# Altium footprint library Connectors_HS.PcbLib: 19 footprints (part 2 of 2)
Each footprint in its own frame and in the unit in brackets; x right, y up, seen from the top. Pads: shape width x height; smd on the part's side, far side on the other; paste and mask are expansions set on the pad; w line width, h text height; cw(c..) or ccw(c..) is an arc to the next point about the centre after c.
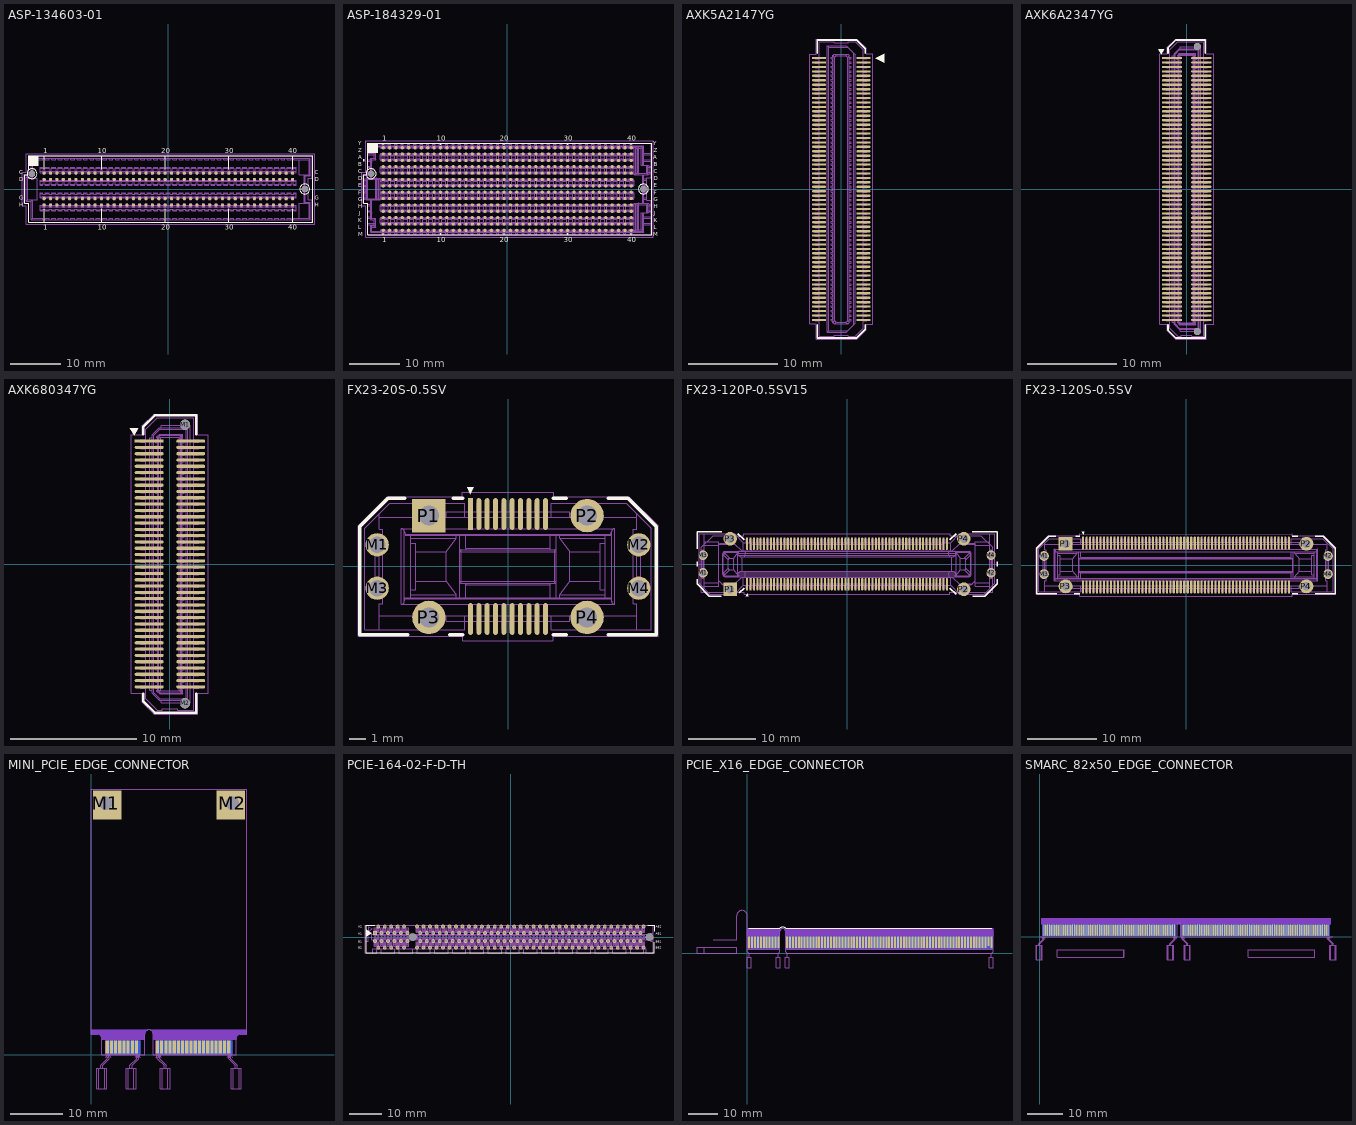
[diagram p1: the footprints below, top view; thin cyan lines are the x and y axes]

## ASP-134603-01 [mm] "VITA57 FMC Connector, LPC"
height 7.57
pads (162):
  round 0.64 smd mask+0.05: C1(-24.765,3.175) C2(-23.495,3.175) C3(-22.225,3.175) C4(-20.955,3.175) C5(-19.685,3.175) C6(-18.415,3.175) C7(-17.145,3.175) C8(-15.875,3.175) C9(-14.605,3.175) C10(-13.335,3.175) C11(-12.065,3.175) C12(-10.795,3.175) C13(-9.525,3.175) C14(-8.255,3.175) C15(-6.985,3.175) C16(-5.715,3.175) C17(-4.445,3.175) C18(-3.175,3.175) C19(-1.905,3.175) C20(-0.635,3.175) C21(0.635,3.175) C22(1.905,3.175) C23(3.175,3.175) C24(4.445,3.175) C25(5.715,3.175) C26(6.985,3.175) C27(8.255,3.175) C28(9.525,3.175) C29(10.795,3.175) C30(12.065,3.175) C31(13.335,3.175) C32(14.605,3.175) C33(15.875,3.175) C34(17.145,3.175) C35(18.415,3.175) C36(19.685,3.175) C37(20.955,3.175) C38(22.225,3.175) C39(23.495,3.175) C40(24.765,3.175) D1(-24.765,1.905) D2(-23.495,1.905) D3(-22.225,1.905) D4(-20.955,1.905) D5(-19.685,1.905) D6(-18.415,1.905) D7(-17.145,1.905) D8(-15.875,1.905) D9(-14.605,1.905) D10(-13.335,1.905) D11(-12.065,1.905) D12(-10.795,1.905) D13(-9.525,1.905) D14(-8.255,1.905) D15(-6.985,1.905) D16(-5.715,1.905) D17(-4.445,1.905) D18(-3.175,1.905) D19(-1.905,1.905) D20(-0.635,1.905) D21(0.635,1.905) D22(1.905,1.905) D23(3.175,1.905) D24(4.445,1.905) D25(5.715,1.905) D26(6.985,1.905) D27(8.255,1.905) D28(9.525,1.905) D29(10.795,1.905) D30(12.065,1.905) D31(13.335,1.905) D32(14.605,1.905) D33(15.875,1.905) D34(17.145,1.905) D35(18.415,1.905) D36(19.685,1.905) D37(20.955,1.905) D38(22.225,1.905) D39(23.495,1.905) D40(24.765,1.905) G1(-24.765,-1.905) G2(-23.495,-1.905) G3(-22.225,-1.905) G4(-20.955,-1.905) G5(-19.685,-1.905) G6(-18.415,-1.905) G7(-17.145,-1.905) G8(-15.875,-1.905) G9(-14.605,-1.905) G10(-13.335,-1.905) G11(-12.065,-1.905) G12(-10.795,-1.905) G13(-9.525,-1.905) G14(-8.255,-1.905) G15(-6.985,-1.905) G16(-5.715,-1.905) G17(-4.445,-1.905) G18(-3.175,-1.905) G19(-1.905,-1.905) G20(-0.635,-1.905) G21(0.635,-1.905) G22(1.905,-1.905) G23(3.175,-1.905) G24(4.445,-1.905) G25(5.715,-1.905) G26(6.985,-1.905) G27(8.255,-1.905) G28(9.525,-1.905) G29(10.795,-1.905) G30(12.065,-1.905) G31(13.335,-1.905) G32(14.605,-1.905) G33(15.875,-1.905) G34(17.145,-1.905) G35(18.415,-1.905) G36(19.685,-1.905) G37(20.955,-1.905) G38(22.225,-1.905) G39(23.495,-1.905) G40(24.765,-1.905) H1(-24.765,-3.175) H2(-23.495,-3.175) H3(-22.225,-3.175) H4(-20.955,-3.175) H5(-19.685,-3.175) H6(-18.415,-3.175) H7(-17.145,-3.175) H8(-15.875,-3.175) H9(-14.605,-3.175) H10(-13.335,-3.175) H11(-12.065,-3.175) H12(-10.795,-3.175) H13(-9.525,-3.175) H14(-8.255,-3.175) H15(-6.985,-3.175) H16(-5.715,-3.175) H17(-4.445,-3.175) H18(-3.175,-3.175) H19(-1.905,-3.175) H20(-0.635,-3.175) H21(0.635,-3.175) H22(1.905,-3.175) H23(3.175,-3.175) H24(4.445,-3.175) H25(5.715,-3.175) H26(6.985,-3.175) H27(8.255,-3.175) H28(9.525,-3.175) H29(10.795,-3.175) H30(12.065,-3.175) H31(13.335,-3.175) H32(14.605,-3.175) H33(15.875,-3.175) H34(17.145,-3.175) H35(18.415,-3.175) H36(19.685,-3.175) H37(20.955,-3.175) H38(22.225,-3.175) H39(23.495,-3.175) H40(24.765,-3.175)
  round 1.27 hole 1.27 unplated: ""(-27.189,3.05) ""(27.191,0)
Top Overlay:
  circle w0.2: c-27.189,3.05 r1
  circle w0.2: c27.191,0 r1
  region: -25.865,6.615 -27.865,6.615 -27.865,4.615 -25.865,4.615
  lines w0.2: -28.2,2.85 -28.665,2.85 -28.665,-2.85 -27.865,-2.85 -27.865,-6.615 28.765,-6.615 28.765,6.615 -27.865,6.615 -27.865,3.8 ; -24.75,-6.6 -24.75,-3.9 ; -24.75,3.9 -24.75,6.6 ; -13.32,-6.6 -13.32,-3.9 ; -13.32,3.9 -13.32,6.6 ; -0.62,-6.6 -0.62,-3.9 ; -0.62,3.9 -0.62,6.6 ; 12.08,-6.6 12.08,-3.9 ; 12.08,3.9 12.08,6.6 ; 24.78,-6.6 24.78,-3.9 ; 24.78,3.9 24.78,6.6
  text "40" at 23.952,-8.1 h1
  text "30" at 11.252,-8.1 h1
  text "20" at -1.448,-8.1 h1
  text "10" at -14.07,-8.1 h1
  text "1" at -24.919,-8.1 h1
  text "40" at 23.952,7.1 h1
  text "30" at 11.252,7.1 h1
  text "20" at -1.448,7.1 h1
  text "10" at -14.07,7.1 h1
  text "1" at -24.919,7.1 h1
  text "H" at 29.233,-3.58 h0.8
  text "G" at 29.214,-2.18 h0.8
  text "D" at 29.233,1.5 h0.8
  text "C" at 29.214,2.9 h0.8
  text "H" at -29.767,-3.58 h0.8
  text "G" at -29.786,-2.18 h0.8
  text "D" at -29.767,1.5 h0.8
  text "C" at -29.786,2.9 h0.8
Top Courtyard:
  lines w0.025: -29.1,-3.3 -28.3,-3.3 -28.3,-7 29.2,-7 29.2,7 -28.3,7 -28.3,3.3 -29.1,3.3 -29.1,-3.3
Top Assembly:
  drawing of 3355 lines, arcs and shapes, not listed
  text ".Designator" at -6.763,7.821 h3
3D body "ASP-134603-01_x_t.x_t": height 6.57, standoff -1.26, extent -28.727,-6.642 28.727,6.642

## ASP-184329-01 [mm] "VITA57.4 FMC Connector, HPC, 560 pin"
height 7.57
pads (562):
  round 0.64 smd mask+0.05: A1(-24.765,5.715) A2(-23.495,5.715) A3(-22.225,5.715) A4(-20.955,5.715) A5(-19.685,5.715) A6(-18.415,5.715) A7(-17.145,5.715) A8(-15.875,5.715) A9(-14.605,5.715) A10(-13.335,5.715) A11(-12.065,5.715) A12(-10.795,5.715) A13(-9.525,5.715) A14(-8.255,5.715) A15(-6.985,5.715) A16(-5.715,5.715) A17(-4.445,5.715) A18(-3.175,5.715) A19(-1.905,5.715) A20(-0.635,5.715) A21(0.635,5.715) A22(1.905,5.715) A23(3.175,5.715) A24(4.445,5.715) A25(5.715,5.715) A26(6.985,5.715) A27(8.255,5.715) A28(9.525,5.715) A29(10.795,5.715) A30(12.065,5.715) A31(13.335,5.715) A32(14.605,5.715) A33(15.875,5.715) A34(17.145,5.715) A35(18.415,5.715) A36(19.685,5.715) A37(20.955,5.715) A38(22.225,5.715) A39(23.495,5.715) A40(24.765,5.715) B1(-24.765,4.445) B2(-23.495,4.445) B3(-22.225,4.445) B4(-20.955,4.445) B5(-19.685,4.445) B6(-18.415,4.445) B7(-17.145,4.445) B8(-15.875,4.445) B9(-14.605,4.445) B10(-13.335,4.445) B11(-12.065,4.445) B12(-10.795,4.445) B13(-9.525,4.445) B14(-8.255,4.445) B15(-6.985,4.445) B16(-5.715,4.445) B17(-4.445,4.445) B18(-3.175,4.445) B19(-1.905,4.445) B20(-0.635,4.445) B21(0.635,4.445) B22(1.905,4.445) B23(3.175,4.445) B24(4.445,4.445) B25(5.715,4.445) B26(6.985,4.445) B27(8.255,4.445) B28(9.525,4.445) B29(10.795,4.445) B30(12.065,4.445) B31(13.335,4.445) B32(14.605,4.445) B33(15.875,4.445) B34(17.145,4.445) B35(18.415,4.445) B36(19.685,4.445) B37(20.955,4.445) B38(22.225,4.445) B39(23.495,4.445) B40(24.765,4.445) C1(-24.765,3.175) C2(-23.495,3.175) C3(-22.225,3.175) C4(-20.955,3.175) C5(-19.685,3.175) C6(-18.415,3.175) C7(-17.145,3.175) C8(-15.875,3.175) C9(-14.605,3.175) C10(-13.335,3.175) C11(-12.065,3.175) C12(-10.795,3.175) C13(-9.525,3.175) C14(-8.255,3.175) C15(-6.985,3.175) C16(-5.715,3.175) C17(-4.445,3.175) C18(-3.175,3.175) C19(-1.905,3.175) C20(-0.635,3.175) C21(0.635,3.175) C22(1.905,3.175) C23(3.175,3.175) C24(4.445,3.175) C25(5.715,3.175) C26(6.985,3.175) C27(8.255,3.175) C28(9.525,3.175) C29(10.795,3.175) C30(12.065,3.175) C31(13.335,3.175) C32(14.605,3.175) C33(15.875,3.175) C34(17.145,3.175) C35(18.415,3.175) C36(19.685,3.175) C37(20.955,3.175) C38(22.225,3.175) C39(23.495,3.175) C40(24.765,3.175) D1(-24.765,1.905) D2(-23.495,1.905) D3(-22.225,1.905) D4(-20.955,1.905) D5(-19.685,1.905) D6(-18.415,1.905) D7(-17.145,1.905) D8(-15.875,1.905) D9(-14.605,1.905) D10(-13.335,1.905) D11(-12.065,1.905) D12(-10.795,1.905) D13(-9.525,1.905) D14(-8.255,1.905) D15(-6.985,1.905) D16(-5.715,1.905) D17(-4.445,1.905) D18(-3.175,1.905) D19(-1.905,1.905) D20(-0.635,1.905) D21(0.635,1.905) D22(1.905,1.905) D23(3.175,1.905) D24(4.445,1.905) D25(5.715,1.905) D26(6.985,1.905) D27(8.255,1.905) D28(9.525,1.905) D29(10.795,1.905) D30(12.065,1.905) D31(13.335,1.905) D32(14.605,1.905) D33(15.875,1.905) D34(17.145,1.905) D35(18.415,1.905) D36(19.685,1.905) D37(20.955,1.905) D38(22.225,1.905) D39(23.495,1.905) D40(24.765,1.905) E1(-24.765,0.635) E2(-23.495,0.635) E3(-22.225,0.635) E4(-20.955,0.635) E5(-19.685,0.635) E6(-18.415,0.635) E7(-17.145,0.635) E8(-15.875,0.635) E9(-14.605,0.635) E10(-13.335,0.635) E11(-12.065,0.635) E12(-10.795,0.635) E13(-9.525,0.635) E14(-8.255,0.635) E15(-6.985,0.635) E16(-5.715,0.635) E17(-4.445,0.635) E18(-3.175,0.635) E19(-1.905,0.635) E20(-0.635,0.635) E21(0.635,0.635) E22(1.905,0.635) E23(3.175,0.635) E24(4.445,0.635) E25(5.715,0.635) E26(6.985,0.635) E27(8.255,0.635) E28(9.525,0.635) E29(10.795,0.635) E30(12.065,0.635) E31(13.335,0.635) E32(14.605,0.635) E33(15.875,0.635) E34(17.145,0.635) E35(18.415,0.635) E36(19.685,0.635) E37(20.955,0.635) E38(22.225,0.635) E39(23.495,0.635) E40(24.765,0.635) F1(-24.765,-0.635) F2(-23.495,-0.635) F3(-22.225,-0.635) F4(-20.955,-0.635) F5(-19.685,-0.635) F6(-18.415,-0.635) F7(-17.145,-0.635) F8(-15.875,-0.635) F9(-14.605,-0.635) F10(-13.335,-0.635) F11(-12.065,-0.635) F12(-10.795,-0.635) F13(-9.525,-0.635) F14(-8.255,-0.635) F15(-6.985,-0.635) F16(-5.715,-0.635) F17(-4.445,-0.635) F18(-3.175,-0.635) F19(-1.905,-0.635) F20(-0.635,-0.635) F21(0.635,-0.635) F22(1.905,-0.635) F23(3.175,-0.635) F24(4.445,-0.635) F25(5.715,-0.635) F26(6.985,-0.635) F27(8.255,-0.635) F28(9.525,-0.635) F29(10.795,-0.635) F30(12.065,-0.635) F31(13.335,-0.635) F32(14.605,-0.635) F33(15.875,-0.635) F34(17.145,-0.635) F35(18.415,-0.635) F36(19.685,-0.635) F37(20.955,-0.635) F38(22.225,-0.635) F39(23.495,-0.635) F40(24.765,-0.635) G1(-24.765,-1.905) G2(-23.495,-1.905) G3(-22.225,-1.905) G4(-20.955,-1.905) G5(-19.685,-1.905) G6(-18.415,-1.905) G7(-17.145,-1.905) G8(-15.875,-1.905) G9(-14.605,-1.905) G10(-13.335,-1.905) G11(-12.065,-1.905) G12(-10.795,-1.905) G13(-9.525,-1.905) G14(-8.255,-1.905) G15(-6.985,-1.905) G16(-5.715,-1.905) G17(-4.445,-1.905) G18(-3.175,-1.905) G19(-1.905,-1.905) G20(-0.635,-1.905) G21(0.635,-1.905) G22(1.905,-1.905) G23(3.175,-1.905) G24(4.445,-1.905) G25(5.715,-1.905) G26(6.985,-1.905) G27(8.255,-1.905) G28(9.525,-1.905) G29(10.795,-1.905) G30(12.065,-1.905) G31(13.335,-1.905) G32(14.605,-1.905) G33(15.875,-1.905) G34(17.145,-1.905) G35(18.415,-1.905) G36(19.685,-1.905) G37(20.955,-1.905) G38(22.225,-1.905) G39(23.495,-1.905) G40(24.765,-1.905) H1(-24.765,-3.175) H2(-23.495,-3.175) H3(-22.225,-3.175) H4(-20.955,-3.175) H5(-19.685,-3.175) H6(-18.415,-3.175) H7(-17.145,-3.175) H8(-15.875,-3.175) H9(-14.605,-3.175) H10(-13.335,-3.175) H11(-12.065,-3.175) H12(-10.795,-3.175) H13(-9.525,-3.175) H14(-8.255,-3.175) H15(-6.985,-3.175) H16(-5.715,-3.175) H17(-4.445,-3.175) H18(-3.175,-3.175) H19(-1.905,-3.175) H20(-0.635,-3.175) H21(0.635,-3.175) H22(1.905,-3.175) H23(3.175,-3.175) H24(4.445,-3.175) H25(5.715,-3.175) H26(6.985,-3.175) H27(8.255,-3.175) H28(9.525,-3.175) H29(10.795,-3.175) H30(12.065,-3.175) H31(13.335,-3.175) H32(14.605,-3.175) H33(15.875,-3.175) H34(17.145,-3.175) H35(18.415,-3.175) H36(19.685,-3.175) H37(20.955,-3.175) H38(22.225,-3.175) H39(23.495,-3.175) H40(24.765,-3.175) J1(-24.765,-4.445) J2(-23.495,-4.445) J3(-22.225,-4.445) J4(-20.955,-4.445) J5(-19.685,-4.445) J6(-18.415,-4.445) J7(-17.145,-4.445) J8(-15.875,-4.445) J9(-14.605,-4.445) J10(-13.335,-4.445) J11(-12.065,-4.445) J12(-10.795,-4.445) J13(-9.525,-4.445) J14(-8.255,-4.445) J15(-6.985,-4.445) J16(-5.715,-4.445) J17(-4.445,-4.445) J18(-3.175,-4.445) J19(-1.905,-4.445) J20(-0.635,-4.445) J21(0.635,-4.445) J22(1.905,-4.445) J23(3.175,-4.445) J24(4.445,-4.445) J25(5.715,-4.445) J26(6.985,-4.445) J27(8.255,-4.445) J28(9.525,-4.445) J29(10.795,-4.445) J30(12.065,-4.445) J31(13.335,-4.445) J32(14.605,-4.445) J33(15.875,-4.445) J34(17.145,-4.445) J35(18.415,-4.445) J36(19.685,-4.445) J37(20.955,-4.445) J38(22.225,-4.445) J39(23.495,-4.445) J40(24.765,-4.445) K1(-24.765,-5.715) K2(-23.495,-5.715) K3(-22.225,-5.715) K4(-20.955,-5.715) K5(-19.685,-5.715) K6(-18.415,-5.715) K7(-17.145,-5.715) K8(-15.875,-5.715) K9(-14.605,-5.715) K10(-13.335,-5.715) K11(-12.065,-5.715) K12(-10.795,-5.715) K13(-9.525,-5.715) K14(-8.255,-5.715) K15(-6.985,-5.715) K16(-5.715,-5.715) K17(-4.445,-5.715) K18(-3.175,-5.715) K19(-1.905,-5.715) K20(-0.635,-5.715) K21(0.635,-5.715) K22(1.905,-5.715) K23(3.175,-5.715) K24(4.445,-5.715) K25(5.715,-5.715) K26(6.985,-5.715) K27(8.255,-5.715) K28(9.525,-5.715) K29(10.795,-5.715) K30(12.065,-5.715) K31(13.335,-5.715) K32(14.605,-5.715) K33(15.875,-5.715) K34(17.145,-5.715) K35(18.415,-5.715) K36(19.685,-5.715) K37(20.955,-5.715) K38(22.225,-5.715) K39(23.495,-5.715) K40(24.765,-5.715) L1(-24.765,-6.985) L2(-23.495,-6.985) L3(-22.225,-6.985) L4(-20.955,-6.985) L5(-19.685,-6.985) L6(-18.415,-6.985) L7(-17.145,-6.985) L8(-15.875,-6.985) L9(-14.605,-6.985) L10(-13.335,-6.985) L11(-12.065,-6.985) L12(-10.795,-6.985) L13(-9.525,-6.985) L14(-8.255,-6.985) L15(-6.985,-6.985) L16(-5.715,-6.985) L17(-4.445,-6.985) L18(-3.175,-6.985) L19(-1.905,-6.985) L20(-0.635,-6.985) L21(0.635,-6.985) L22(1.905,-6.985) L23(3.175,-6.985) L24(4.445,-6.985) L25(5.715,-6.985) L26(6.985,-6.985) L27(8.255,-6.985) L28(9.525,-6.985) L29(10.795,-6.985) L30(12.065,-6.985) L31(13.335,-6.985) L32(14.605,-6.985) L33(15.875,-6.985) L34(17.145,-6.985) L35(18.415,-6.985) L36(19.685,-6.985) L37(20.955,-6.985) L38(22.225,-6.985) L39(23.495,-6.985) L40(24.765,-6.985) M1(-24.765,-8.255) M2(-23.495,-8.255) M3(-22.225,-8.255) M4(-20.955,-8.255) M5(-19.685,-8.255) M6(-18.415,-8.255) M7(-17.145,-8.255) M8(-15.875,-8.255) M9(-14.605,-8.255) M10(-13.335,-8.255) M11(-12.065,-8.255) M12(-10.795,-8.255) M13(-9.525,-8.255) M14(-8.255,-8.255) M15(-6.985,-8.255) M16(-5.715,-8.255) M17(-4.445,-8.255) M18(-3.175,-8.255) M19(-1.905,-8.255) M20(-0.635,-8.255) M21(0.635,-8.255) M22(1.905,-8.255) M23(3.175,-8.255) M24(4.445,-8.255) M25(5.715,-8.255) M26(6.985,-8.255) M27(8.255,-8.255) M28(9.525,-8.255) M29(10.795,-8.255) M30(12.065,-8.255) M31(13.335,-8.255) M32(14.605,-8.255) M33(15.875,-8.255) M34(17.145,-8.255) M35(18.415,-8.255) M36(19.685,-8.255) M37(20.955,-8.255) M38(22.225,-8.255) M39(23.495,-8.255) M40(24.765,-8.255) Y1(-24.765,8.255) Y2(-23.495,8.255) Y3(-22.225,8.255) Y4(-20.955,8.255) Y5(-19.685,8.255) Y6(-18.415,8.255) Y7(-17.145,8.255) Y8(-15.875,8.255) Y9(-14.605,8.255) Y10(-13.335,8.255) Y11(-12.065,8.255) Y12(-10.795,8.255) Y13(-9.525,8.255) Y14(-8.255,8.255) Y15(-6.985,8.255) Y16(-5.715,8.255) Y17(-4.445,8.255) Y18(-3.175,8.255) Y19(-1.905,8.255) Y20(-0.635,8.255) Y21(0.635,8.255) Y22(1.905,8.255) Y23(3.175,8.255) Y24(4.445,8.255) Y25(5.715,8.255) Y26(6.985,8.255) Y27(8.255,8.255) Y28(9.525,8.255) Y29(10.795,8.255) Y30(12.065,8.255) Y31(13.335,8.255) Y32(14.605,8.255) Y33(15.875,8.255) Y34(17.145,8.255) Y35(18.415,8.255) Y36(19.685,8.255) Y37(20.955,8.255) Y38(22.225,8.255) Y39(23.495,8.255) Y40(24.765,8.255) Z1(-24.765,6.985) Z2(-23.495,6.985) Z3(-22.225,6.985) Z4(-20.955,6.985) Z5(-19.685,6.985) Z6(-18.415,6.985) Z7(-17.145,6.985) Z8(-15.875,6.985) Z9(-14.605,6.985) Z10(-13.335,6.985) Z11(-12.065,6.985) Z12(-10.795,6.985) Z13(-9.525,6.985) Z14(-8.255,6.985) Z15(-6.985,6.985) Z16(-5.715,6.985) Z17(-4.445,6.985) Z18(-3.175,6.985) Z19(-1.905,6.985) Z20(-0.635,6.985) Z21(0.635,6.985) Z22(1.905,6.985) Z23(3.175,6.985) Z24(4.445,6.985) Z25(5.715,6.985) Z26(6.985,6.985) Z27(8.255,6.985) Z28(9.525,6.985) Z29(10.795,6.985) Z30(12.065,6.985) Z31(13.335,6.985) Z32(14.605,6.985) Z33(15.875,6.985) Z34(17.145,6.985) Z35(18.415,6.985) Z36(19.685,6.985) Z37(20.955,6.985) Z38(22.225,6.985) Z39(23.495,6.985) Z40(24.765,6.985)
  round 1.27 hole 1.27 unplated: ""(-27.19,3.05) ""(27.19,0)
Top Overlay:
  circle w0.2: c27.19,0 r1
  circle w0.2: c-27.19,3.05 r1
  circle w0.2: c-28.636,5.736 r0.1
  region: -25.815,9.18 -27.815,9.18 -27.815,7.18 -25.815,7.18
  lines w0.2: -28.2,2.845 -28.655,2.845 -28.655,-2.845 -27.815,-2.845 -27.815,-9.18 28.825,-9.18 28.825,9.18 -27.815,9.18 -27.815,3.85 ; -24.75,-9.14 -24.75,-8.84 ; -24.75,8.84 -24.75,9.14 ; -13.32,-9.14 -13.32,-8.84 ; -13.32,8.84 -13.32,9.14 ; -0.62,-9.14 -0.62,-8.84 ; -0.62,8.84 -0.62,9.14 ; 12.08,-9.14 12.08,-8.84 ; 12.08,8.84 12.08,9.14 ; 24.78,-9.14 24.78,-8.84 ; 24.78,8.84 24.78,9.14
  text "M" at -29.805,-9.48 h0.8
  text "L" at -29.729,-8.08 h0.8
  text "Y" at -29.805,8.7 h0.8
  text "Z" at -29.767,7.3 h0.8
  text "K" at -29.767,-6.68 h0.8
  text "J" at -29.69,-5.28 h0.8
  text "F" at -29.748,-1.1 h0.8
  text "E" at -29.748,0.3 h0.8
  text "A" at -29.805,5.9 h0.8
  text "B" at -29.767,4.5 h0.8
  text "H" at -29.767,-3.88 h0.8
  text "G" at -29.786,-2.48 h0.8
  text "D" at -29.767,1.7 h0.8
  text "C" at -29.786,3.1 h0.8
  text "K" at 29.233,-6.68 h0.8
  text "J" at 29.31,-5.28 h0.8
  text "F" at 29.252,-1.1 h0.8
  text "E" at 29.252,0.3 h0.8
  text "A" at 29.195,5.9 h0.8
  text "B" at 29.233,4.5 h0.8
  text "H" at 29.233,-3.88 h0.8
  text "G" at 29.214,-2.48 h0.8
  text "D" at 29.233,1.7 h0.8
  text "C" at 29.214,3.1 h0.8
  text "M" at 29.195,-9.48 h0.8
  text "L" at 29.271,-8.08 h0.8
  text "Y" at 29.195,8.7 h0.8
  text "Z" at 29.233,7.3 h0.8
  text "40" at 23.952,9.64 h1
  text "30" at 11.252,9.64 h1
  text "20" at -1.448,9.64 h1
  text "10" at -14.07,9.64 h1
  text "1" at -24.919,9.64 h1
  text "40" at 23.952,-10.64 h1
  text "30" at 11.252,-10.64 h1
  text "20" at -1.448,-10.64 h1
  text "10" at -14.07,-10.64 h1
  text "1" at -24.919,-10.64 h1
Top Courtyard:
  lines w0.025: -29.1,-3.3 -29.1,3.3 -28.3,3.3 -28.3,9.65 29.2,9.65 29.2,-9.65 -28.3,-9.65 -28.3,-3.3 -29.1,-3.3
Top Assembly:
  drawing of 12131 lines, arcs and shapes, not listed
  text ".Designator" at -6.763,10.321 h3
3D body "ASP-184329-01_X_T.x_t": height 6.75, standoff -1.07, extent -28.727,-9.182 28.727,9.182

## AXK5A2147YG [mm] "Socket 120 pin"
height 0.6
pads (120):
  rect 1.6x0.25 smd mask+0.05: 1(2.5,14.75)
  oval 1.6x0.25 smd mask+0.05: 2(-2.5,14.75) 3(2.5,14.25) 4(-2.5,14.25) 5(2.5,13.75) 6(-2.5,13.75) 7(2.5,13.25) 8(-2.5,13.25) 9(2.5,12.75) 10(-2.5,12.75) 11(2.5,12.25) 12(-2.5,12.25) 13(2.5,11.75) 14(-2.5,11.75) 15(2.5,11.25) 16(-2.5,11.25) 17(2.5,10.75) 18(-2.5,10.75) 19(2.5,10.25) 20(-2.5,10.25) 21(2.5,9.75) 22(-2.5,9.75) 23(2.5,9.25) 24(-2.5,9.25) 25(2.5,8.75) 26(-2.5,8.75) 27(2.5,8.25) 28(-2.5,8.25) 29(2.5,7.75) 30(-2.5,7.75) 31(2.5,7.25) 32(-2.5,7.25) 33(2.5,6.75) 34(-2.5,6.75) 35(2.5,6.25) 36(-2.5,6.25) 37(2.5,5.75) 38(-2.5,5.75) 39(2.5,5.25) 40(-2.5,5.25) 41(2.5,4.75) 42(-2.5,4.75) 43(2.5,4.25) 44(-2.5,4.25) 45(2.5,3.75) 46(-2.5,3.75) 47(2.5,3.25) 48(-2.5,3.25) 49(2.5,2.75) 50(-2.5,2.75) 51(2.5,2.25) 52(-2.5,2.25) 53(2.5,1.75) 54(-2.5,1.75) 55(2.5,1.25) 56(-2.5,1.25) 57(2.5,0.75) 58(-2.5,0.75) 59(2.5,0.25) 60(-2.5,0.25) 61(2.5,-0.25) 62(-2.5,-0.25) 63(2.5,-0.75) 64(-2.5,-0.75) 65(2.5,-1.25) 66(-2.5,-1.25) 67(2.5,-1.75) 68(-2.5,-1.75) 69(2.5,-2.25) 70(-2.5,-2.25) 71(2.5,-2.75) 72(-2.5,-2.75) 73(2.5,-3.25) 74(-2.5,-3.25) 75(2.5,-3.75) 76(-2.5,-3.75) 77(2.5,-4.25) 78(-2.5,-4.25) 79(2.5,-4.75) 80(-2.5,-4.75) 81(2.5,-5.25) 82(-2.5,-5.25) 83(2.5,-5.75) 84(-2.5,-5.75) 85(2.5,-6.25) 86(-2.5,-6.25) 87(2.5,-6.75) 88(-2.5,-6.75) 89(2.5,-7.25) 90(-2.5,-7.25) 91(2.5,-7.75) 92(-2.5,-7.75) 93(2.5,-8.25) 94(-2.5,-8.25) 95(2.5,-8.75) 96(-2.5,-8.75) 97(2.5,-9.25) 98(-2.5,-9.25) 99(2.5,-9.75) 100(-2.5,-9.75) 101(2.5,-10.25) 102(-2.5,-10.25) 103(2.5,-10.75) 104(-2.5,-10.75) 105(2.5,-11.25) 106(-2.5,-11.25) 107(2.5,-11.75) 108(-2.5,-11.75) 109(2.5,-12.25) 110(-2.5,-12.25) 111(2.5,-12.75) 112(-2.5,-12.75) 113(2.5,-13.25) 114(-2.5,-13.25) 115(2.5,-13.75) 116(-2.5,-13.75) 117(2.5,-14.25) 118(-2.5,-14.25) 119(2.5,-14.75) 120(-2.5,-14.75)
Top Overlay:
  region: 3.85,14.75 4.85,15.25 4.85,14.25
  lines w0.2: -2.7,-15.3 -2.7,-16.8 1.7,-16.8 2.7,-15.8 2.7,-15.3 ; -2.7,15.3 -2.7,16.8 1.7,16.8 2.7,15.8 2.7,15.3
Top Courtyard:
  lines w0.025: -3.55,-15.2 -3.55,15.2 -2.8,15.2 -2.8,16.9 1.75,16.9 2.8,15.85 2.8,15.25 3.55,15.25 3.55,-15.25 2.8,-15.25 2.8,-15.85 1.75,-16.9 -2.8,-16.9 -2.8,-15.2 -3.55,-15.2
Top Assembly:
  drawing of 1036 lines, arcs and shapes, not listed
  text ".Designator" at 0.453,-4.511 h2
3D body "AXK5A2147Y.STEP": height 2.35, standoff 0, extent -2.9,-16.6 2.9,16.6

## AXK6A2347YG [mm] "Header 120 pin"
height 0.6
pads (122):
  rect 2.3x0.25 smd mask+0.05: 1(-1.65,14.75)
  oval 2.3x0.25 smd mask+0.05: 2(1.65,14.75) 3(-1.65,14.25) 4(1.65,14.25) 5(-1.65,13.75) 6(1.65,13.75) 7(-1.65,13.25) 8(1.65,13.25) 9(-1.65,12.75) 10(1.65,12.75) 11(-1.65,12.25) 12(1.65,12.25) 13(-1.65,11.75) 14(1.65,11.75) 15(-1.65,11.25) 16(1.65,11.25) 17(-1.65,10.75) 18(1.65,10.75) 19(-1.65,10.25) 20(1.65,10.25) 21(-1.65,9.75) 22(1.65,9.75) 23(-1.65,9.25) 24(1.65,9.25) 25(-1.65,8.75) 26(1.65,8.75) 27(-1.65,8.25) 28(1.65,8.25) 29(-1.65,7.75) 30(1.65,7.75) 31(-1.65,7.25) 32(1.65,7.25) 33(-1.65,6.75) 34(1.65,6.75) 35(-1.65,6.25) 36(1.65,6.25) 37(-1.65,5.75) 38(1.65,5.75) 39(-1.65,5.25) 40(1.65,5.25) 41(-1.65,4.75) 42(1.65,4.75) 43(-1.65,4.25) 44(1.65,4.25) 45(-1.65,3.75) 46(1.65,3.75) 47(-1.65,3.25) 48(1.65,3.25) 49(-1.65,2.75) 50(1.65,2.75) 51(-1.65,2.25) 52(1.65,2.25) 53(-1.65,1.75) 54(1.65,1.75) 55(-1.65,1.25) 56(1.65,1.25) 57(-1.65,0.75) 58(1.65,0.75) 59(-1.65,0.25) 60(1.65,0.25) 61(-1.65,-0.25) 62(1.65,-0.25) 63(-1.65,-0.75) 64(1.65,-0.75) 65(-1.65,-1.25) 66(1.65,-1.25) 67(-1.65,-1.75) 68(1.65,-1.75) 69(-1.65,-2.25) 70(1.65,-2.25) 71(-1.65,-2.75) 72(1.65,-2.75) 73(-1.65,-3.25) 74(1.65,-3.25) 75(-1.65,-3.75) 76(1.65,-3.75) 77(-1.65,-4.25) 78(1.65,-4.25) 79(-1.65,-4.75) 80(1.65,-4.75) 81(-1.65,-5.25) 82(1.65,-5.25) 83(-1.65,-5.75) 84(1.65,-5.75) 85(-1.65,-6.25) 86(1.65,-6.25) 87(-1.65,-6.75) 88(1.65,-6.75) 89(-1.65,-7.25) 90(1.65,-7.25) 91(-1.65,-7.75) 92(1.65,-7.75) 93(-1.65,-8.25) 94(1.65,-8.25) 95(-1.65,-8.75) 96(1.65,-8.75) 97(-1.65,-9.25) 98(1.65,-9.25) 99(-1.65,-9.75) 100(1.65,-9.75) 101(-1.65,-10.25) 102(1.65,-10.25) 103(-1.65,-10.75) 104(1.65,-10.75) 105(-1.65,-11.25) 106(1.65,-11.25) 107(-1.65,-11.75) 108(1.65,-11.75) 109(-1.65,-12.25) 110(1.65,-12.25) 111(-1.65,-12.75) 112(1.65,-12.75) 113(-1.65,-13.25) 114(1.65,-13.25) 115(-1.65,-13.75) 116(1.65,-13.75) 117(-1.65,-14.25) 118(1.65,-14.25) 119(-1.65,-14.75) 120(1.65,-14.75)
  round 0.8 hole 0.8 unplated: M1(1.2,16.05) M2(1.2,-16.05)
Top Overlay:
  region: -2.85,15.2 -2.5,15.75 -3.2,15.75
  lines w0.2: -2.1,-15.3 -2.1,-15.9 -1.2,-16.8 2.1,-16.8 2.1,-15.3 ; -2.1,15.3 -2.1,15.9 -1.2,16.8 2.1,16.8 2.1,15.3
Top Courtyard:
  lines w0.025: -3.05,-15.25 -2.2,-15.25 -2.2,-15.95 -1.25,-16.9 2.2,-16.9 2.2,-15.25 3.05,-15.25 3.05,15.25 2.2,15.25 2.2,16.9 -1.25,16.9 -2.2,15.95 -2.2,15.25 -3.05,15.25 -3.05,-15.25
Top Assembly:
  drawing of 2854 lines, arcs and shapes, not listed
  text ".Designator" at 0.453,-4.511 h2
3D body "axk6a2347y.x_t": height 2.4, standoff 0, extent -2.3,-16.6 2.3,16.6

## AXK680347YG [mm] "Header 80 pin"
height 0.6
pads (82):
  rect 2.3x0.25 smd mask+0.05: 1(-1.65,9.75)
  oval 2.3x0.25 smd mask+0.05: 2(1.65,9.75) 3(-1.65,9.25) 4(1.65,9.25) 5(-1.65,8.75) 6(1.65,8.75) 7(-1.65,8.25) 8(1.65,8.25) 9(-1.65,7.75) 10(1.65,7.75) 11(-1.65,7.25) 12(1.65,7.25) 13(-1.65,6.75) 14(1.65,6.75) 15(-1.65,6.25) 16(1.65,6.25) 17(-1.65,5.75) 18(1.65,5.75) 19(-1.65,5.25) 20(1.65,5.25) 21(-1.65,4.75) 22(1.65,4.75) 23(-1.65,4.25) 24(1.65,4.25) 25(-1.65,3.75) 26(1.65,3.75) 27(-1.65,3.25) 28(1.65,3.25) 29(-1.65,2.75) 30(1.65,2.75) 31(-1.65,2.25) 32(1.65,2.25) 33(-1.65,1.75) 34(1.65,1.75) 35(-1.65,1.25) 36(1.65,1.25) 37(-1.65,0.75) 38(1.65,0.75) 39(-1.65,0.25) 40(1.65,0.25) 41(-1.65,-0.25) 42(1.65,-0.25) 43(-1.65,-0.75) 44(1.65,-0.75) 45(-1.65,-1.25) 46(1.65,-1.25) 47(-1.65,-1.75) 48(1.65,-1.75) 49(-1.65,-2.25) 50(1.65,-2.25) 51(-1.65,-2.75) 52(1.65,-2.75) 53(-1.65,-3.25) 54(1.65,-3.25) 55(-1.65,-3.75) 56(1.65,-3.75) 57(-1.65,-4.25) 58(1.65,-4.25) 59(-1.65,-4.75) 60(1.65,-4.75) 61(-1.65,-5.25) 62(1.65,-5.25) 63(-1.65,-5.75) 64(1.65,-5.75) 65(-1.65,-6.25) 66(1.65,-6.25) 67(-1.65,-6.75) 68(1.65,-6.75) 69(-1.65,-7.25) 70(1.65,-7.25) 71(-1.65,-7.75) 72(1.65,-7.75) 73(-1.65,-8.25) 74(1.65,-8.25) 75(-1.65,-8.75) 76(1.65,-8.75) 77(-1.65,-9.25) 78(1.65,-9.25) 79(-1.65,-9.75) 80(1.65,-9.75)
  round 0.8 hole 0.8 unplated: M1(1.2,11.05) M2(1.2,-11.05)
Top Overlay:
  region: -2.85,10.2 -2.5,10.75 -3.2,10.75
  lines w0.2: -2.1,-10.3 -2.1,-10.9 -1.2,-11.8 2.1,-11.8 2.1,-10.3 ; -2.1,10.3 -2.1,10.9 -1.2,11.8 2.1,11.8 2.1,10.3
Top Courtyard:
  lines w0.025: -3.05,-10.25 -3.05,10.25 -2.2,10.25 -2.2,10.95 -1.25,11.9 2.2,11.9 2.2,10.25 3.05,10.25 3.05,-10.25 2.2,-10.25 2.2,-11.9 -1.25,-11.9 -2.2,-10.95 -2.2,-10.25 -3.05,-10.25
Top Assembly:
  drawing of 954 lines, arcs and shapes, not listed
  text ".Designator" at 0.453,-4.511 h2
3D body "axk680347y.x_t": height 2.4, standoff 0, extent -2.3,-11.6 2.3,11.6

## FX23-20S-0.5SV [mm] "Socket 20 pin"
height 0.6
pads (28):
  rect 0.3x1.9 smd mask+0.05: 1(-2.25,3.15)
  oval 0.3x1.9 smd mask+0.05: 2(-1.75,3.15) 3(-1.25,3.15) 4(-0.75,3.15) 5(-0.25,3.15) 6(0.25,3.15) 7(0.75,3.15) 8(1.25,3.15) 9(1.75,3.15) 10(2.25,3.15) 11(-2.25,-3.15) 12(-1.75,-3.15) 13(-1.25,-3.15) 14(-0.75,-3.15) 15(-0.25,-3.15) 16(0.25,-3.15) 17(0.75,-3.15) 18(1.25,-3.15) 19(1.75,-3.15) 20(2.25,-3.15)
  round 1.4 hole 1 mask+0.05: M1(-7.85,1.3) M2(7.85,1.3) M3(-7.85,-1.3) M4(7.85,-1.3)
  rect 2x2 hole 1.2 mask+0.05: P1(-4.75,3.05)
  round 2 hole 1.2 mask+0.05: P2(4.75,3.05) P3(-4.75,-3.05) P4(4.75,-3.05)
Top Overlay:
  region: -2.25,4.35 -2.45,4.75 -2.05,4.75
  lines w0.2: -6.2,4.1 -7.2,4.1 -8.9,2.4 -8.9,-4.1 -6,-4.1 ; -3.5,-4.1 -2.7,-4.1 ; -3.3,4.1 -2.7,4.1 ; 2.7,-4.1 3.5,-4.1 ; 2.7,4.1 3.5,4.1 ; 6,-4.1 8.9,-4.1 8.9,2.4 7.2,4.1 6,4.1
Top Courtyard:
  lines w0.025: -9,-4.2 -9,2.45 -7.25,4.2 -2.75,4.2 -2.75,4.45 2.75,4.45 2.75,4.2 7.25,4.2 9,2.45 9,-4.2 2.7,-4.2 2.7,-4.45 -2.7,-4.45 -2.7,-4.2 -9,-4.2
Top Assembly:
  drawing of 2292 lines, arcs and shapes, not listed
  text ".Designator" at -4.511,-0.453 h2
3D body "FX23-20S-0.5SV.x_t": height 6.8, standoff -1.35, extent -8.6,-3.8 8.6,3.8

## FX23-120P-0.5SV15 [mm] "Terminal 120 pin"
height 0.6
pads (128):
  rect 0.3x1.9 smd mask+0.05: 1(-14.75,-3)
  oval 0.3x1.9 smd mask+0.05: 2(-14.25,-3) 3(-13.75,-3) 4(-13.25,-3) 5(-12.75,-3) 6(-12.25,-3) 7(-11.75,-3) 8(-11.25,-3) 9(-10.75,-3) 10(-10.25,-3) 11(-9.75,-3) 12(-9.25,-3) 13(-8.75,-3) 14(-8.25,-3) 15(-7.75,-3) 16(-7.25,-3) 17(-6.75,-3) 18(-6.25,-3) 19(-5.75,-3) 20(-5.25,-3) 21(-4.75,-3) 22(-4.25,-3) 23(-3.75,-3) 24(-3.25,-3) 25(-2.75,-3) 26(-2.25,-3) 27(-1.75,-3) 28(-1.25,-3) 29(-0.75,-3) 30(-0.25,-3) 31(0.25,-3) 32(0.75,-3) 33(1.25,-3) 34(1.75,-3) 35(2.25,-3) 36(2.75,-3) 37(3.25,-3) 38(3.75,-3) 39(4.25,-3) 40(4.75,-3) 41(5.25,-3) 42(5.75,-3) 43(6.25,-3) 44(6.75,-3) 45(7.25,-3) 46(7.75,-3) 47(8.25,-3) 48(8.75,-3) 49(9.25,-3) 50(9.75,-3) 51(10.25,-3) 52(10.75,-3) 53(11.25,-3) 54(11.75,-3) 55(12.25,-3) 56(12.75,-3) 57(13.25,-3) 58(13.75,-3) 59(14.25,-3) 60(14.75,-3) 61(-14.75,3) 62(-14.25,3) 63(-13.75,3) 64(-13.25,3) 65(-12.75,3) 66(-12.25,3) 67(-11.75,3) 68(-11.25,3) 69(-10.75,3) 70(-10.25,3) 71(-9.75,3) 72(-9.25,3) 73(-8.75,3) 74(-8.25,3) 75(-7.75,3) 76(-7.25,3) 77(-6.75,3) 78(-6.25,3) 79(-5.75,3) 80(-5.25,3) 81(-4.75,3) 82(-4.25,3) 83(-3.75,3) 84(-3.25,3) 85(-2.75,3) 86(-2.25,3) 87(-1.75,3) 88(-1.25,3) 89(-0.75,3) 90(-0.25,3) 91(0.25,3) 92(0.75,3) 93(1.25,3) 94(1.75,3) 95(2.25,3) 96(2.75,3) 97(3.25,3) 98(3.75,3) 99(4.25,3) 100(4.75,3) 101(5.25,3) 102(5.75,3) 103(6.25,3) 104(6.75,3) 105(7.25,3) 106(7.75,3) 107(8.25,3) 108(8.75,3) 109(9.25,3) 110(9.75,3) 111(10.25,3) 112(10.75,3) 113(11.25,3) 114(11.75,3) 115(12.25,3) 116(12.75,3) 117(13.25,3) 118(13.75,3) 119(14.25,3) 120(14.75,3)
  round 1.4 hole 1 mask+0.05: M1(-21.25,-1.3) M2(21.25,-1.3) M3(-21.25,1.3) M4(21.25,1.3)
  rect 2x2 hole 1.2 mask+0.05: P1(-17.25,-3.725)
  round 2 hole 1.2 mask+0.05: P2(17.25,-3.725) P3(-17.25,3.725) P4(17.25,3.725)
Top Overlay:
  region: -14.75,-4.35 -14.95,-4.75 -14.55,-4.75
  lines w0.2: -22.15,-2.25 -22.15,-2.95 -20.35,-4.75 -18.6,-4.75 ; -22.15,-0.35 -22.15,0.35 ; -22.15,2.25 -22.15,4.75 -18.5,4.75 ; -16.1,4.45 -15.2,3.55 ; -15.9,-4.25 -15.2,-3.55 ; 15.2,-3.55 16.1,-4.45 ; 15.2,3.55 16.1,4.45 ; 18.5,4.75 22.15,4.75 22.15,2.25 ; 18.6,-4.75 20.35,-4.75 22.15,-2.95 22.15,-2.25 ; 22.15,-0.35 22.15,0.35
Top Courtyard:
  lines w0.025: 15.2,-4.45 -15.2,-4.45 -15.2,-4.2 -21.5,-4.2 -21.5,2.45 -19.75,4.2 -15.25,4.2 -15.25,4.45 15.25,4.45 15.25,4.2 19.75,4.2 21.5,2.45 21.5,-4.2 15.2,-4.2 15.2,-4.45
Top Assembly:
  drawing of 3911 lines, arcs and shapes, not listed
  text ".Designator" at -4.511,-0.453 h2
3D body "FX23-120P-0.5SV15.x_t": height 12.85, standoff -1.35, extent -21.85,-4.45 21.85,4.45

## FX23-120S-0.5SV [mm] "Socket 120 pin"
height 0.6
pads (128):
  rect 0.3x1.9 smd mask+0.05: 1(-14.75,3.15)
  oval 0.3x1.9 smd mask+0.05: 2(-14.25,3.15) 3(-13.75,3.15) 4(-13.25,3.15) 5(-12.75,3.15) 6(-12.25,3.15) 7(-11.75,3.15) 8(-11.25,3.15) 9(-10.75,3.15) 10(-10.25,3.15) 11(-9.75,3.15) 12(-9.25,3.15) 13(-8.75,3.15) 14(-8.25,3.15) 15(-7.75,3.15) 16(-7.25,3.15) 17(-6.75,3.15) 18(-6.25,3.15) 19(-5.75,3.15) 20(-5.25,3.15) 21(-4.75,3.15) 22(-4.25,3.15) 23(-3.75,3.15) 24(-3.25,3.15) 25(-2.75,3.15) 26(-2.25,3.15) 27(-1.75,3.15) 28(-1.25,3.15) 29(-0.75,3.15) 30(-0.25,3.15) 31(0.25,3.15) 32(0.75,3.15) 33(1.25,3.15) 34(1.75,3.15) 35(2.25,3.15) 36(2.75,3.15) 37(3.25,3.15) 38(3.75,3.15) 39(4.25,3.15) 40(4.75,3.15) 41(5.25,3.15) 42(5.75,3.15) 43(6.25,3.15) 44(6.75,3.15) 45(7.25,3.15) 46(7.75,3.15) 47(8.25,3.15) 48(8.75,3.15) 49(9.25,3.15) 50(9.75,3.15) 51(10.25,3.15) 52(10.75,3.15) 53(11.25,3.15) 54(11.75,3.15) 55(12.25,3.15) 56(12.75,3.15) 57(13.25,3.15) 58(13.75,3.15) 59(14.25,3.15) 60(14.75,3.15) 61(-14.75,-3.15) 62(-14.25,-3.15) 63(-13.75,-3.15) 64(-13.25,-3.15) 65(-12.75,-3.15) 66(-12.25,-3.15) 67(-11.75,-3.15) 68(-11.25,-3.15) 69(-10.75,-3.15) 70(-10.25,-3.15) 71(-9.75,-3.15) 72(-9.25,-3.15) 73(-8.75,-3.15) 74(-8.25,-3.15) 75(-7.75,-3.15) 76(-7.25,-3.15) 77(-6.75,-3.15) 78(-6.25,-3.15) 79(-5.75,-3.15) 80(-5.25,-3.15) 81(-4.75,-3.15) 82(-4.25,-3.15) 83(-3.75,-3.15) 84(-3.25,-3.15) 85(-2.75,-3.15) 86(-2.25,-3.15) 87(-1.75,-3.15) 88(-1.25,-3.15) 89(-0.75,-3.15) 90(-0.25,-3.15) 91(0.25,-3.15) 92(0.75,-3.15) 93(1.25,-3.15) 94(1.75,-3.15) 95(2.25,-3.15) 96(2.75,-3.15) 97(3.25,-3.15) 98(3.75,-3.15) 99(4.25,-3.15) 100(4.75,-3.15) 101(5.25,-3.15) 102(5.75,-3.15) 103(6.25,-3.15) 104(6.75,-3.15) 105(7.25,-3.15) 106(7.75,-3.15) 107(8.25,-3.15) 108(8.75,-3.15) 109(9.25,-3.15) 110(9.75,-3.15) 111(10.25,-3.15) 112(10.75,-3.15) 113(11.25,-3.15) 114(11.75,-3.15) 115(12.25,-3.15) 116(12.75,-3.15) 117(13.25,-3.15) 118(13.75,-3.15) 119(14.25,-3.15) 120(14.75,-3.15)
  round 1.4 hole 1 mask+0.05: M1(-20.35,1.3) M2(20.35,1.3) M3(-20.35,-1.3) M4(20.35,-1.3)
  rect 2x2 hole 1.2 mask+0.05: P1(-17.25,3.05)
  round 2 hole 1.2 mask+0.05: P2(17.25,3.05) P3(-17.25,-3.05) P4(17.25,-3.05)
Top Overlay:
  region: -14.75,4.35 -14.95,4.75 -14.55,4.75
  lines w0.2: -18.7,4.1 -19.7,4.1 -21.4,2.4 -21.4,-4.1 -18.5,-4.1 ; -16,-4.1 -15.2,-4.1 ; -15.8,4.1 -15.2,4.1 ; 15.2,-4.1 16,-4.1 ; 15.2,4.1 16,4.1 ; 18.5,-4.1 21.4,-4.1 21.4,2.4 19.7,4.1 18.5,4.1
Top Courtyard:
  lines w0.025: 15.2,-4.45 -15.2,-4.45 -15.2,-4.2 -21.5,-4.2 -21.5,2.45 -19.75,4.2 -15.25,4.2 -15.25,4.45 15.25,4.45 15.25,4.2 19.75,4.2 21.5,2.45 21.5,-4.2 15.2,-4.2 15.2,-4.45
Top Assembly:
  drawing of 2592 lines, arcs and shapes, not listed
  text ".Designator" at -4.511,-0.453 h2
3D body "FX23-120S-0.5SV.x_t": height 6.8, standoff -1.35, extent -21.1,-3.8 21.1,3.8

## MINI_PCIE_EDGE_CONNECTOR [mm] "Mini PCI Express PCB Edge Connector"
height 1.6
pads (54):
  rect 0.6x2.5 smd paste-2: 1(3.05,1.5) 3(3.85,1.5) 5(4.65,1.5) 7(5.45,1.5) 9(6.25,1.5) 11(7.05,1.5) 13(7.85,1.5) 15(8.65,1.5) 17(12.65,1.5) 19(13.45,1.5) 21(14.25,1.5) 23(15.05,1.5) 25(15.85,1.5) 27(16.65,1.5) 29(17.45,1.5) 31(18.25,1.5) 33(19.05,1.5) 35(19.85,1.5) 37(20.65,1.5) 39(21.45,1.5) 41(22.25,1.5) 43(23.05,1.5) 45(23.85,1.5) 47(24.65,1.5) 49(25.45,1.5) 51(26.25,1.5)
  rect 0.6x2.5 smd far side paste-2: 2(3.45,1.5) 4(4.25,1.5) 6(5.05,1.5) 8(5.85,1.5) 10(6.65,1.5) 12(7.45,1.5) 14(8.25,1.5) 16(9.05,1.5) 18(13.05,1.5) 20(13.85,1.5) 22(14.65,1.5) 24(15.45,1.5) 26(16.25,1.5) 28(17.05,1.5) 30(17.85,1.5) 32(18.65,1.5) 34(19.45,1.5) 36(20.25,1.5) 38(21.05,1.5) 40(21.85,1.5) 42(22.65,1.5) 44(23.45,1.5) 46(24.25,1.5) 48(25.05,1.5) 50(25.85,1.5) 52(26.65,1.5)
  rect 5.5x5.5 hole 2.6 copper offset 0.3,-0.3 paste-2539.97 mask+0: M1(2.75,48.05)
  rect 5.5x5.5 hole 2.6 copper offset -0.3,-0.3 paste-2539.97 mask+0: M2(26.95,48.05)
Top Layer keep-out:
  region: 28.5,4 11.8,4 11.8,2.9 27.7,2.9 27.7,3.2 27.704,3.278 27.734,3.432 27.794,3.577 27.882,3.708 27.992,3.818 28.123,3.906 28.268,3.966 28.422,3.996
  region: 1.2,4 10.2,4 10.2,2.9 2,2.9 2,3.2 1.996,3.278 1.966,3.432 1.906,3.577 1.818,3.708 1.708,3.818 1.577,3.906 1.432,3.966 1.278,3.996
Bottom Layer keep-out:
  region: 29.7,4.8 11,4.8 11.078,4.796 11.232,4.766 11.377,4.706 11.508,4.618 11.618,4.508 11.706,4.377 11.766,4.232 11.796,4.078 11.8,4 11.8,2.9 27.7,2.9 27.7,3.2 27.704,3.278 27.734,3.432 27.794,3.577 27.882,3.708 27.992,3.818 28.123,3.906 28.268,3.966 28.422,3.996 28.5,4 29.7,4
  region: 0,4.8 11,4.8 10.922,4.796 10.768,4.766 10.623,4.706 10.492,4.618 10.382,4.508 10.294,4.377 10.234,4.232 10.204,4.078 10.2,4 10.2,2.9 2,2.9 2,3.2 1.996,3.278 1.966,3.432 1.906,3.577 1.818,3.708 1.708,3.818 1.577,3.906 1.432,3.966 1.278,3.996 1.2,4 0,4
Top Solder:
  rectangle: 2,0 10.2,2.9
  rectangle: 11.8,0 27.7,2.9
Bottom Solder:
  rectangle: 2,0 10.2,2.9
  rectangle: 11.8,0 27.7,2.9
Top 3D Body:
  circle w0.1: c2.75,48.05 r1.3
  circle w0.1: c26.95,48.05 r1.3
Top Assembly:
  drawing of 156 lines, arcs and shapes, not listed
  text "1" at 2.331,-4.732 h1.65
  text "15" at 7.921,-5.241 h1.65
  text "17" at 14.431,-5.23 h1.65
  text "51" at 28.021,-5.168 h1.65
Bottom Assembly:
  drawing of 156 lines, arcs and shapes, not listed
  text "52" at 27.379,-5.251 h1.65
  text "18" at 13.779,-5.23 h1.65
  text "16" at 7.279,-5.237 h1.65
  text "2" at 1.669,-4.855 h1.65

## PCIE-164-02-F-D-TH [mm] "PCI Express x16 Edge Card Socket"
height 10
pads (166):
  rect 1.208x1.208 hole 0.7: A1(-42,1.25)
  round 1.208 hole 0.7: A2(-41,3.25) A3(-40,1.25) A4(-39,3.25) A5(-38,1.25) A6(-37,3.25) A7(-36,1.25) A8(-35,3.25) A9(-34,1.25) A10(-33,3.25) A11(-32,1.25) A12(-29,3.25) A13(-28,1.25) A14(-27,3.25) A15(-26,1.25) A16(-25,3.25) A17(-24,1.25) A18(-23,3.25) A19(-22,1.25) A20(-21,3.25) A21(-20,1.25) A22(-19,3.25) A23(-18,1.25) A24(-17,3.25) A25(-16,1.25) A26(-15,3.25) A27(-14,1.25) A28(-13,3.25) A29(-12,1.25) A30(-11,3.25) A31(-10,1.25) A32(-9,3.25) A33(-8,1.25) A34(-7,3.25) A35(-6,1.25) A36(-5,3.25) A37(-4,1.25) A38(-3,3.25) A39(-2,1.25) A40(-1,3.25) A41(0,1.25) A42(1,3.25) A43(2,1.25) A44(3,3.25) A45(4,1.25) A46(5,3.25) A47(6,1.25) A48(7,3.25) A49(8,1.25) A50(9,3.25) A51(10,1.25) A52(11,3.25) A53(12,1.25) A54(13,3.25) A55(14,1.25) A56(15,3.25) A57(16,1.25) A58(17,3.25) A59(18,1.25) A60(19,3.25) A61(20,1.25) A62(21,3.25) A63(22,1.25) A64(23,3.25) A65(24,1.25) A66(25,3.25) A67(26,1.25) A68(27,3.25) A69(28,1.25) A70(29,3.25) A71(30,1.25) A72(31,3.25) A73(32,1.25) A74(33,3.25) A75(34,1.25) A76(35,3.25) A77(36,1.25) A78(37,3.25) A79(38,1.25) A80(39,3.25) A81(40,1.25) A82(41,3.25) B1(-42,-1.25) B2(-41,-3.25) B3(-40,-1.25) B4(-39,-3.25) B5(-38,-1.25) B6(-37,-3.25) B7(-36,-1.25) B8(-35,-3.25) B9(-34,-1.25) B10(-33,-3.25) B11(-32,-1.25) B12(-29,-3.25) B13(-28,-1.25) B14(-27,-3.25) B15(-26,-1.25) B16(-25,-3.25) B17(-24,-1.25) B18(-23,-3.25) B19(-22,-1.25) B20(-21,-3.25) B21(-20,-1.25) B22(-19,-3.25) B23(-18,-1.25) B24(-17,-3.25) B25(-16,-1.25) B26(-15,-3.25) B27(-14,-1.25) B28(-13,-3.25) B29(-12,-1.25) B30(-11,-3.25) B31(-10,-1.25) B32(-9,-3.25) B33(-8,-1.25) B34(-7,-3.25) B35(-6,-1.25) B36(-5,-3.25) B37(-4,-1.25) B38(-3,-3.25) B39(-2,-1.25) B40(-1,-3.25) B41(0,-1.25) B42(1,-3.25) B43(2,-1.25) B44(3,-3.25) B45(4,-1.25) B46(5,-3.25) B47(6,-1.25) B48(7,-3.25) B49(8,-1.25) B50(9,-3.25) B51(10,-1.25) B52(11,-3.25) B53(12,-1.25) B54(13,-3.25) B55(14,-1.25) B56(15,-3.25) B57(16,-1.25) B58(17,-3.25) B59(18,-1.25) B60(19,-3.25) B61(20,-1.25) B62(21,-3.25) B63(22,-1.25) B64(23,-3.25) B65(24,-1.25) B66(25,-3.25) B67(26,-1.25) B68(27,-3.25) B69(28,-1.25) B70(29,-3.25) B71(30,-1.25) B72(31,-3.25) B73(32,-1.25) B74(33,-3.25) B75(34,-1.25) B76(35,-3.25) B77(36,-1.25) B78(37,-3.25) B79(38,-1.25) B80(39,-3.25) B81(40,-1.25) B82(41,-3.25)
  round 2.35 hole 2.35 unplated: ""(-30.35,0) ""(42.8,0)
Top Overlay:
  region: -43,1.25 -44.5,0.25 -44.5,2.25
  lines w0.2: -42.05,3.71 -44.7,3.71 -44.7,-4.9 44.3,-4.9 44.3,-1.6 ; 42.35,3.71 44.3,3.71 44.3,1.8
  text "B81" at 44.741,-1.73 h0.7
  text "B82" at 44.741,-3.68 h0.7
  text "A82" at 44.741,2.82 h0.7
  text "A81" at 44.741,0.77 h0.7
  text "B1" at -47.259,-1.73 h0.7
  text "B2" at -47.259,-3.68 h0.7
  text "A2" at -47.259,2.82 h0.7
  text "A1" at -47.259,0.77 h0.7
Top Assembly:
  drawing of 4212 lines, arcs and shapes, not listed
  text ".Designator" at -6.763,4.321 h3
3D body "PCIE-164-02-F-D-TH.stp": height 11.03, standoff -4.37, extent -44.95,-5.05 44.05,3.65

## PCIE_X16_EDGE_CONNECTOR [mm] "PCI Express x16 PCB Edge Connector"
pads (164):
  rect 0.7x3.2 smd far side paste-1 mask+0.1: A1(0.65,4)
  rect 0.7x3.9 smd far side paste-1 mask+0.1: A2(1.65,3.65) A3(2.65,3.65) A4(3.65,3.65) A5(4.65,3.65) A6(5.65,3.65) A7(6.65,3.65) A8(7.65,3.65) A9(8.65,3.65) A10(9.65,3.65) A11(10.65,3.65) A12(13.65,3.65) A13(14.65,3.65) A14(15.65,3.65) A15(16.65,3.65) A16(17.65,3.65) A17(18.65,3.65) A18(19.65,3.65) A19(20.65,3.65) A20(21.65,3.65) A21(22.65,3.65) A22(23.65,3.65) A23(24.65,3.65) A24(25.65,3.65) A25(26.65,3.65) A26(27.65,3.65) A27(28.65,3.65) A28(29.65,3.65) A29(30.65,3.65) A30(31.65,3.65) A31(32.65,3.65) A32(33.65,3.65) A33(34.65,3.65) A34(35.65,3.65) A35(36.65,3.65) A36(37.65,3.65) A37(38.65,3.65) A38(39.65,3.65) A39(40.65,3.65) A40(41.65,3.65) A41(42.65,3.65) A42(43.65,3.65) A43(44.65,3.65) A44(45.65,3.65) A45(46.65,3.65) A46(47.65,3.65) A47(48.65,3.65) A48(49.65,3.65) A49(50.65,3.65) A50(51.65,3.65) A51(52.65,3.65) A52(53.65,3.65) A53(54.65,3.65) A54(55.65,3.65) A55(56.65,3.65) A56(57.65,3.65) A57(58.65,3.65) A58(59.65,3.65) A59(60.65,3.65) A60(61.65,3.65) A61(62.65,3.65) A62(63.65,3.65) A63(64.65,3.65) A64(65.65,3.65) A65(66.65,3.65) A66(67.65,3.65) A67(68.65,3.65) A68(69.65,3.65) A69(70.65,3.65) A70(71.65,3.65) A71(72.65,3.65) A72(73.65,3.65) A73(74.65,3.65) A74(75.65,3.65) A75(76.65,3.65) A76(77.65,3.65) A77(78.65,3.65) A78(79.65,3.65) A79(80.65,3.65) A80(81.65,3.65) A81(82.65,3.65) A82(83.65,3.65)
  rect 0.7x3.9 smd paste-1 mask+0.1: B1(0.65,3.65) B2(1.65,3.65) B3(2.65,3.65) B4(3.65,3.65) B5(4.65,3.65) B6(5.65,3.65) B7(6.65,3.65) B8(7.65,3.65) B9(8.65,3.65) B10(9.65,3.65) B11(10.65,3.65) B12(13.65,3.65) B13(14.65,3.65) B14(15.65,3.65) B15(16.65,3.65) B16(17.65,3.65) B17(18.65,3.65) B18(19.65,3.65) B19(20.65,3.65) B20(21.65,3.65) B21(22.65,3.65) B22(23.65,3.65) B23(24.65,3.65) B24(25.65,3.65) B25(26.65,3.65) B26(27.65,3.65) B27(28.65,3.65) B28(29.65,3.65) B29(30.65,3.65) B30(31.65,3.65) B31(32.65,3.65) B32(33.65,3.65) B33(34.65,3.65) B34(35.65,3.65) B35(36.65,3.65) B36(37.65,3.65) B37(38.65,3.65) B38(39.65,3.65) B39(40.65,3.65) B40(41.65,3.65) B41(42.65,3.65) B42(43.65,3.65) B43(44.65,3.65) B44(45.65,3.65) B45(46.65,3.65) B46(47.65,3.65) B47(48.65,3.65) B48(49.65,3.65) B49(50.65,3.65) B50(51.65,3.65) B51(52.65,3.65) B52(53.65,3.65) B53(54.65,3.65) B54(55.65,3.65) B55(56.65,3.65) B56(57.65,3.65) B57(58.65,3.65) B58(59.65,3.65) B59(60.65,3.65) B60(61.65,3.65) B61(62.65,3.65) B62(63.65,3.65) B63(64.65,3.65) B64(65.65,3.65) B65(66.65,3.65) B66(67.65,3.65) B67(68.65,3.65) B68(69.65,3.65) B69(70.65,3.65) B70(71.65,3.65) B71(72.65,3.65) B72(73.65,3.65) B73(74.65,3.65) B74(75.65,3.65) B75(76.65,3.65) B76(77.65,3.65) B77(78.65,3.65) B78(79.65,3.65) B79(80.65,3.65) B80(81.65,3.65) B82(83.65,3.65)
  rect 0.7x3.2 smd paste-1 mask+0.1: B81(82.65,4)
Top Layer keep-out:
  region: 84.3,8.4 13.1,8.4 13.1,5.8 84.3,5.8
  region: 0,8.4 11.2,8.4 11.2,5.8 0,5.8
Bottom Layer keep-out:
  region: 13.1,8.4 84.3,8.4 84.3,5.8 13.1,5.8
  region: 0,8.4 11.2,8.4 11.2,5.8 0,5.8
Top Overlay:
  lines w0.2: 0.5,8.5 11.15,8.5 cw(c12.15,7.45) 13.151,8.499 83.8,8.499
Bottom Overlay:
  lines w0.2: 0.5,8.5 11.15,8.5 cw(c12.15,7.45) 13.151,8.499 83.8,8.499
Top Solder:
  region: 0.5,0 10.7,0 11.2,0.5 11.2,5.7 0,5.7 0,0.5
  region: 83.8,0 13.6,0 13.1,0.5 13.1,5.7 84.3,5.7 84.3,0.5
Bottom Solder:
  region: 83.8,0 13.6,0 13.1,0.5 13.1,5.7 84.3,5.7 84.3,0.5
  region: 0.5,0 10.7,0 11.2,0.5 11.2,5.7 0,5.7 0,0.5
Top Assembly:
  drawing of 370 lines, arcs and shapes, not listed
  text "B82" at 84.171,-4.47 h1.65
  text "B12" at 14.181,-4.47 h1.65
  text "B11" at 11.18,-4.374 h1.65
  text "B1" at 1.18,-3.963 h1.65
  text "PRIMARY SIDE" at -14.394,0.472 h1.65
Bottom Assembly:
  drawing of 370 lines, arcs and shapes, not listed
  text "SECONDARY SIDE" at -3.971,0.472 h1.65
  text "A1" at 0.12,-4.018 h1.65
  text "A11" at 10.12,-4.428 h1.65
  text "A12" at 13.12,-4.525 h1.65
  text "A82" at 83.129,-4.525 h1.65

## SMARC_82x50_EDGE_CONNECTOR [mm] "MXM3 PCB Edge Connector"
pads (314):
  rect 0.35x3.1 smd paste-1 mask+0: P1(1.25,1.75)
  oval 0.35x3.1 smd paste-1 mask+0: P2(1.75,1.75) P3(2.25,1.75) P4(2.75,1.75) P5(3.25,1.75) P6(3.75,1.75) P7(4.25,1.75) P8(4.75,1.75) P9(5.25,1.75) P10(5.75,1.75) P11(6.25,1.75) P12(6.75,1.75) P13(7.25,1.75) P14(7.75,1.75) P15(8.25,1.75) P16(8.75,1.75) P17(9.25,1.75) P18(9.75,1.75) P19(10.25,1.75) P20(10.75,1.75) P21(11.25,1.75) P22(11.75,1.75) P23(12.25,1.75) P24(12.75,1.75) P25(13.25,1.75) P26(13.75,1.75) P27(14.25,1.75) P28(14.75,1.75) P29(15.25,1.75) P30(15.75,1.75) P31(16.25,1.75) P32(16.75,1.75) P33(17.25,1.75) P34(17.75,1.75) P35(18.25,1.75) P36(18.75,1.75) P37(19.25,1.75) P38(19.75,1.75) P39(20.25,1.75) P40(20.75,1.75) P41(21.25,1.75) P42(21.75,1.75) P43(22.25,1.75) P44(22.75,1.75) P45(23.25,1.75) P46(23.75,1.75) P47(24.25,1.75) P48(24.75,1.75) P49(25.25,1.75) P50(25.75,1.75) P51(26.25,1.75) P52(26.75,1.75) P53(27.25,1.75) P54(27.75,1.75) P55(28.25,1.75) P56(28.75,1.75) P57(29.25,1.75) P58(29.75,1.75) P59(30.25,1.75) P60(30.75,1.75) P61(31.25,1.75) P62(31.75,1.75) P63(32.25,1.75) P64(32.75,1.75) P65(33.25,1.75) P66(33.75,1.75) P67(34.25,1.75) P68(34.75,1.75) P69(35.25,1.75) P70(35.75,1.75) P71(36.25,1.75) P72(36.75,1.75) P73(37.25,1.75) P74(37.75,1.75) P75(40.25,1.75) P76(40.75,1.75) P77(41.25,1.75) P78(41.75,1.75) P79(42.25,1.75) P80(42.75,1.75) P81(43.25,1.75) P82(43.75,1.75) P83(44.25,1.75) P84(44.75,1.75) P85(45.25,1.75) P86(45.75,1.75) P87(46.25,1.75) P88(46.75,1.75) P89(47.25,1.75) P90(47.75,1.75) P91(48.25,1.75) P92(48.75,1.75) P93(49.25,1.75) P94(49.75,1.75) P95(50.25,1.75) P96(50.75,1.75) P97(51.25,1.75) P98(51.75,1.75) P99(52.25,1.75) P100(52.75,1.75) P101(53.25,1.75) P102(53.75,1.75) P103(54.25,1.75) P104(54.75,1.75) P105(55.25,1.75) P106(55.75,1.75) P107(56.25,1.75) P108(56.75,1.75) P109(57.25,1.75) P110(57.75,1.75) P111(58.25,1.75) P112(58.75,1.75) P113(59.25,1.75) P114(59.75,1.75) P115(60.25,1.75) P116(60.75,1.75) P117(61.25,1.75) P118(61.75,1.75) P119(62.25,1.75) P120(62.75,1.75) P121(63.25,1.75) P122(63.75,1.75) P123(64.25,1.75) P124(64.75,1.75) P125(65.25,1.75) P126(65.75,1.75) P127(66.25,1.75) P128(66.75,1.75) P129(67.25,1.75) P130(67.75,1.75) P131(68.25,1.75) P132(68.75,1.75) P133(69.25,1.75) P134(69.75,1.75) P135(70.25,1.75) P136(70.75,1.75) P137(71.25,1.75) P138(71.75,1.75) P139(72.25,1.75) P140(72.75,1.75) P141(73.25,1.75) P142(73.75,1.75) P143(74.25,1.75) P144(74.75,1.75) P145(75.25,1.75) P146(75.75,1.75) P147(76.25,1.75) P148(76.75,1.75) P149(77.25,1.75) P150(77.75,1.75) P151(78.25,1.75) P152(78.75,1.75) P153(79.25,1.75) P154(79.75,1.75) P155(80.25,1.75) P156(80.75,1.75)
  rect 0.35x3.1 smd far side paste-1 mask+0: S1(1,1.75)
  oval 0.35x3.1 smd far side paste-1 mask+0: S2(1.5,1.75) S3(2,1.75) S4(2.5,1.75) S5(3,1.75) S6(3.5,1.75) S7(4,1.75) S8(4.5,1.75) S9(5,1.75) S10(5.5,1.75) S11(6,1.75) S12(6.5,1.75) S13(7,1.75) S14(7.5,1.75) S15(8,1.75) S16(8.5,1.75) S17(9,1.75) S18(9.5,1.75) S19(10,1.75) S20(10.5,1.75) S21(11,1.75) S22(11.5,1.75) S23(12,1.75) S24(12.5,1.75) S25(13,1.75) S26(13.5,1.75) S27(14,1.75) S28(14.5,1.75) S29(15,1.75) S30(15.5,1.75) S31(16,1.75) S32(16.5,1.75) S33(17,1.75) S34(17.5,1.75) S35(18,1.75) S36(18.5,1.75) S37(19,1.75) S38(19.5,1.75) S39(20,1.75) S40(20.5,1.75) S41(21,1.75) S42(21.5,1.75) S43(22,1.75) S44(22.5,1.75) S45(23,1.75) S46(23.5,1.75) S47(24,1.75) S48(24.5,1.75) S49(25,1.75) S50(25.5,1.75) S51(26,1.75) S52(26.5,1.75) S53(27,1.75) S54(27.5,1.75) S55(28,1.75) S56(28.5,1.75) S57(29,1.75) S58(29.5,1.75) S59(30,1.75) S60(30.5,1.75) S61(31,1.75) S62(31.5,1.75) S63(32,1.75) S64(32.5,1.75) S65(33,1.75) S66(33.5,1.75) S67(34,1.75) S68(34.5,1.75) S69(35,1.75) S70(35.5,1.75) S71(36,1.75) S72(36.5,1.75) S73(37,1.75) S74(37.5,1.75) S75(38,1.75) S76(40,1.75) S77(40.5,1.75) S78(41,1.75) S79(41.5,1.75) S80(42,1.75) S81(42.5,1.75) S82(43,1.75) S83(43.5,1.75) S84(44,1.75) S85(44.5,1.75) S86(45,1.75) S87(45.5,1.75) S88(46,1.75) S89(46.5,1.75) S90(47,1.75) S91(47.5,1.75) S92(48,1.75) S93(48.5,1.75) S94(49,1.75) S95(49.5,1.75) S96(50,1.75) S97(50.5,1.75) S98(51,1.75) S99(51.5,1.75) S100(52,1.75) S101(52.5,1.75) S102(53,1.75) S103(53.5,1.75) S104(54,1.75) S105(54.5,1.75) S106(55,1.75) S107(55.5,1.75) S108(56,1.75) S109(56.5,1.75) S110(57,1.75) S111(57.5,1.75) S112(58,1.75) S113(58.5,1.75) S114(59,1.75) S115(59.5,1.75) S116(60,1.75) S117(60.5,1.75) S118(61,1.75) S119(61.5,1.75) S120(62,1.75) S121(62.5,1.75) S122(63,1.75) S123(63.5,1.75) S124(64,1.75) S125(64.5,1.75) S126(65,1.75) S127(65.5,1.75) S128(66,1.75) S129(66.5,1.75) S130(67,1.75) S131(67.5,1.75) S132(68,1.75) S133(68.5,1.75) S134(69,1.75) S135(69.5,1.75) S136(70,1.75) S137(70.5,1.75) S138(71,1.75) S139(71.5,1.75) S140(72,1.75) S141(72.5,1.75) S142(73,1.75) S143(73.5,1.75) S144(74,1.75) S145(74.5,1.75) S146(75,1.75) S147(75.5,1.75) S148(76,1.75) S149(76.5,1.75) S150(77,1.75) S151(77.5,1.75) S152(78,1.75) S153(78.5,1.75) S154(79,1.75) S155(79.5,1.75) S156(80,1.75) S157(80.5,1.75) S158(81,1.75)
Top Layer keep-out:
  region: 0.5,5.1 81.5,5.1 81.5,3.45 0.5,3.45
Bottom Layer keep-out:
  region: 0.5,5.1 81.5,5.1 81.5,3.45 0.5,3.45
Top Solder:
  region: 0,3.35 38.5,3.35 38.5,0 0,0
  region: 82,3.35 39.5,3.35 39.5,0 82,0
Bottom Solder:
  region: 82,3.35 39.5,3.35 39.5,0 82,0
  region: 0,3.35 38.5,3.35 38.5,0 0,0
Top Assembly:
  drawing of 1297 lines, arcs and shapes, not listed
  text "TOP SIDE" at 10.858,-5.278 h1.65
  text "P156" at 82.521,-6.144 h1.65
  text "P75" at 42.018,-5.737 h1.65
  text "P74" at 37.031,-5.742 h1.65
  text "P1" at 0.531,-5.228 h1.65
  text "SMARC 2.1" at 63.959,-5.278 h1.65
Bottom Assembly:
  drawing of 1313 lines, arcs and shapes, not listed
  text "SMARC 2.1" at 18.041,-5.278 h1.65
  text "BOTTOM SIDE" at 72.785,-5.278 h1.65
  text "S158" at 81.722,-6.165 h1.65
  text "S76" at 40.722,-5.762 h1.65
  text "S75" at 36.222,-5.765 h1.65
  text "S1" at -0.778,-5.256 h1.65